# EAGLE library part ESP32 (library arca)
ESP32 DOIT DevKit V1 30 pin
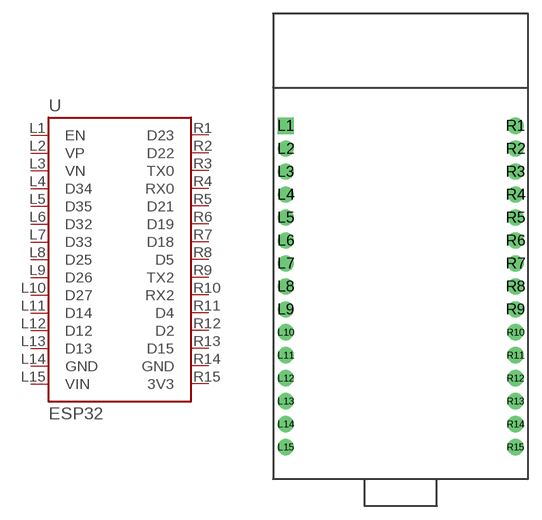
[diagram p0: symbol with the pads of ESP32_DEVKIT_V1_30; footprint ESP32_DEVKIT_V1_30]

Designator prefix U

## ESP32  [ESP32_DEVKIT_V1_30]
L1  EN  pas
L2  VP  pas
L3  VN  pas
L4  D34  pas
L5  D35  pas
L6  D32  pas
L7  D33  pas
L8  D25  pas
L9  D26  pas
L10  D27  pas
L11  D14  pas
L12  D12  pas
L13  D13  pas
L14  GND  pas
L15  VIN  pas
R1  D23  pas
R2  D22  pas
R3  TX0  pas
R4  RX0  pas
R5  D21  pas
R6  D19  pas
R7  D18  pas
R8  D5  pas
R9  TX2  pas
R10  RX2  pas
R11  D4  pas
R12  D2  pas
R13  D15  pas
R14  GND  pas
R15  3V3  pas

## Footprint ESP32_DEVKIT_V1_30 (pad centres in mm)
ESP32 DOIT DevKit V1 30 pin, socket 2x15, jarak baris 25.4 mm
drill 1 pad 1.8 square: L1 -12.7,17.78
drill 1 pad 1.8 round: L2 -12.7,15.24; L3 -12.7,12.7; L4 -12.7,10.16; L5 -12.7,7.62; L6 -12.7,5.08; L7 -12.7,2.54; L8 -12.7,0; L9 -12.7,-2.54; L10 -12.7,-5.08; L11 -12.7,-7.62; L12 -12.7,-10.16; L13 -12.7,-12.7; L14 -12.7,-15.24; L15 -12.7,-17.78; R1 12.7,17.78; R2 12.7,15.24; R3 12.7,12.7; R4 12.7,10.16; R5 12.7,7.62; R6 12.7,5.08; R7 12.7,2.54; R8 12.7,0; R9 12.7,-2.54; R10 12.7,-5.08; R11 12.7,-7.62; R12 12.7,-10.16; R13 12.7,-12.7; R14 12.7,-15.24; R15 12.7,-17.78